# Altium footprint library altiumll.PcbLib: 39 footprints (part 3 of 3)
Each footprint in its own frame and in the unit in brackets; x right, y up, seen from the top. Pads: shape width x height; smd on the part's side, far side on the other; paste and mask are expansions set on the pad; w line width, h text height; cw(c..) or ccw(c..) is an arc to the next point about the centre after c.
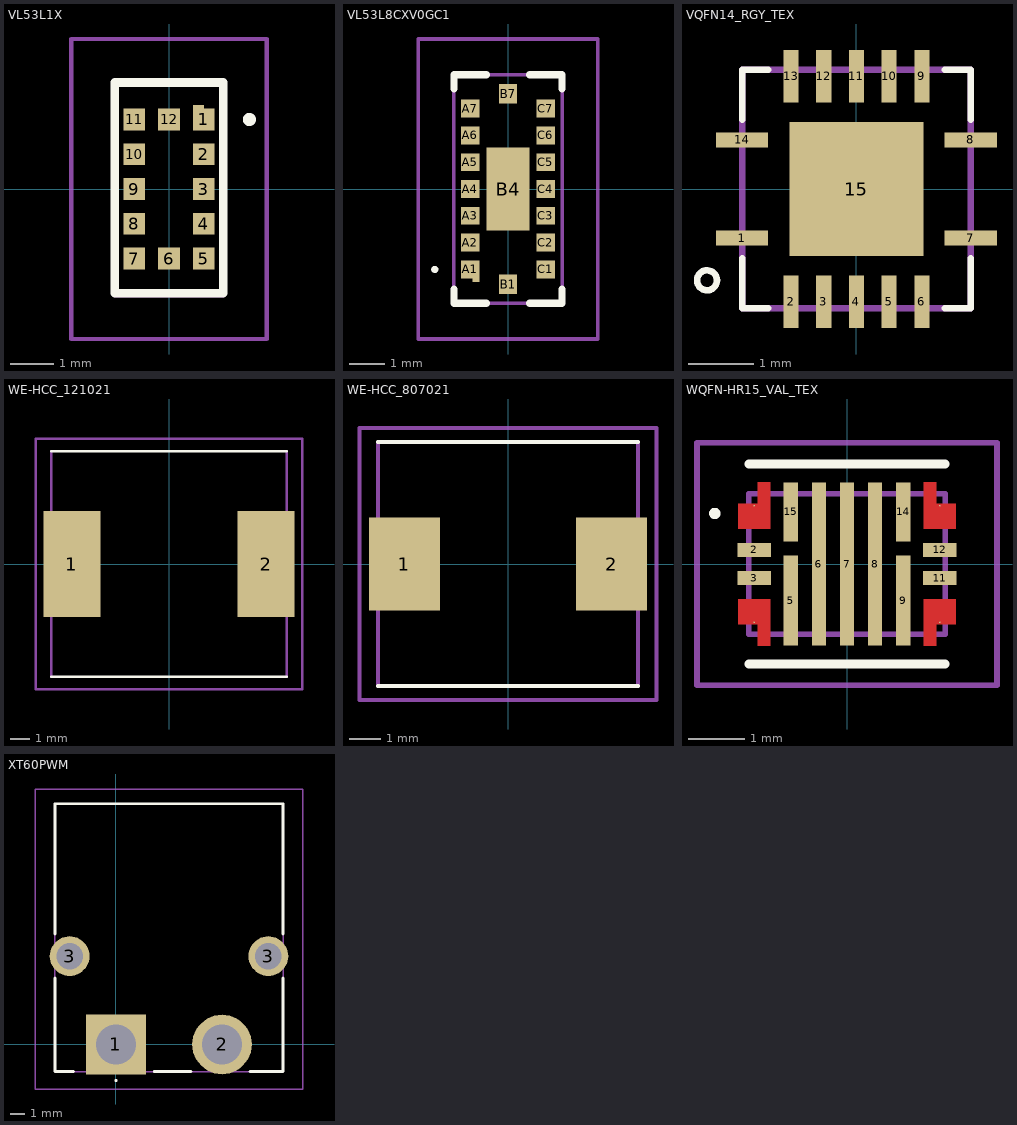
[diagram p2: the footprints below, top view; thin cyan lines are the x and y axes]

## VL53L1X [mm]
pads (13):
  rect 0.25x0.08 smd: 1(0.675,1.89)
  rect 0.5x0.5 smd: 1(0.8,1.6) 2(0.8,0.8) 3(0.8,0) 4(0.8,-0.8) 5(0.8,-1.6) 6(0,-1.6) 7(-0.8,-1.6) 8(-0.8,-0.8) 9(-0.8,0) 10(-0.8,0.8) 11(-0.8,1.6) 12(0,1.6)
Top Overlay:
  lines w0.2: 1.8,1.6 ccw(c1.85,1.6) 1.9,1.6 ; 1.8,1.6 cw(c1.85,1.6) 1.9,1.6 ; 1.8,1.6 ccw(c1.85,1.6) 1.9,1.6 ; -1.25,-2.4 -1.25,2.45 1.25,2.45 1.25,-2.4 -1.25,-2.4
Mechanical 13:
  lines w0.1: -1.25,-2.45 -1.25,2.45 1.25,2.45 1.25,-2.45 -1.25,-2.45
Mechanical 15:
  lines w0.1: -2.25,-3.45 -2.25,3.45 2.25,3.45 2.25,-3.45 -2.25,-3.45
3D body "VL53L1X.stp": height 1.56, standoff 0, extent -1.25,-2.45 1.25,2.45

## VL53L8CXV0GC1 [mm]
pads (18):
  rect 0.515x0.5 smd: A1(-1.058,-2.25) A2(-1.058,-1.5) A3(-1.058,-0.75) A4(-1.058,0) A5(-1.058,0.75) A6(-1.058,1.5) A7(-1.058,2.25) C1(1.058,-2.25) C2(1.058,-1.5) C3(1.058,-0.75) C4(1.058,0) C5(1.058,0.75) C6(1.058,1.5) C7(1.058,2.25)
  rect 0.2x0.1 smd: A1(-0.9,-2.55)
  rect 0.5x0.535 smd: B1(0,-2.668) B7(0,2.668)
  rect 1.2x2.316 smd: B4(0,0)
Top Overlay:
  lines w0.1: -2.1,-2.25 cw(c-2.05,-2.25) -2,-2.25 cw(c-2.05,-2.25) -2.1,-2.25
  lines w0.2: -1.515,-2.8 -1.515,-3.2 -0.6,-3.2 ; -1.515,2.8 -1.515,3.2 -0.6,3.2 ; 0.6,-3.2 1.515,-3.2 1.515,-2.8 ; 0.6,3.2 1.515,3.2 1.515,2.8
Mechanical 13:
  lines w0.1: -1.515,-3.2 -1.515,3.2 1.515,3.2 1.515,-3.2 -1.515,-3.2
Mechanical 15:
  lines w0.1: -2.515,-4.2 -2.515,4.2 2.515,4.2 2.515,-4.2 -2.515,-4.2
3D body "VL53L8CXV0GC_1.stp": height 4.75, standoff 0, extent -2.209,-4.388 1.989,3.809

## VQFN14_RGY_TEX [mm]
pads (15):
  rect 0.8x0.23 smd: 1(-1.75,-0.75) 7(1.75,-0.75) 8(1.75,0.75) 14(-1.75,0.75)
  rect 0.23x0.8 smd: 2(-1,-1.725) 3(-0.5,-1.725) 4(0,-1.725) 5(0.5,-1.725) 6(1,-1.725) 9(1,1.725) 10(0.5,1.725) 11(0,1.725) 12(-0.5,1.725) 13(-1,1.725)
  rect 2.05x2.05 smd: 15(0,0)
Top Overlay:
  circle w0.1: c-2.286,-1.397 r0.153
  lines w0.1: -1.75,-1.061 -1.75,-1.825 -1.35,-1.825 ; -1.75,1.061 -1.75,1.825 -1.35,1.825 ; 1.35,-1.825 1.75,-1.825 1.75,-1.061 ; 1.35,1.825 1.75,1.825 1.75,1.061
Mechanical 13:
  lines w0.1: -1.75,-1.825 -1.75,1.825 1.75,1.825 1.75,-1.825 -1.75,-1.825
3D body "TXS0104ERGYR.stp": height 0.97, standoff 0, extent -1.75,-1.75 1.75,1.75

## WE-HCC_121021 [mm]
pads (2):
  rect 2.9x5.4 smd: 1(-4.95,0) 2(4.95,0)
Top Overlay:
  lines w0.127: -6,-5.75 6,-5.75 ; -6,5.75 6,5.75
Mechanical 13:
  lines w0.127: -6,-5.75 -6,5.75 ; 6,-5.75 6,5.75
Mechanical 15:
  lines w0.127: -6.8,-6.4 -6.8,6.4 6.8,6.4 6.8,-6.4 -6.8,-6.4
3D body "7443320470.stp": height 9.35, standoff -0.15, extent -6.05,-5.7 6.05,5.7

## WE-HCC_807021 [mm]
pads (2):
  rect 2.3x3 smd: 1(-3.35,0) 2(3.35,0)
Top Overlay:
  lines w0.127: -4.2,-3.95 4.2,-3.95 ; -4.2,3.95 4.2,3.95
Mechanical 13:
  lines w0.127: -4.2,-3.95 -4.2,3.95 ; 4.2,-3.95 4.2,3.95
Mechanical 15:
  lines w0.127: -4.8,-4.4 4.8,-4.4 4.8,4.4 -4.8,4.4 -4.8,-4.4
3D body "7443340150.stp": height 7.15, standoff -0.05, extent -4.2,-3.95 4.2,3.95

## WQFN-HR15_VAL_TEX [mm]
pads (15):
  round 0.025 smd: 1(-1.65,1.038) 4(-1.65,-1.038) 10(1.65,-1.038) 13(1.65,1.038)
  rect 0.6x0.25 smd: 2(-1.65,0.251) 3(-1.65,-0.249) 11(1.65,-0.249) 12(1.65,0.251)
  rect 0.25x1.6 smd: 5(-1,-0.649) 9(1,-0.649)
  rect 0.25x2.9 smd: 6(-0.5,0) 7(0,0) 8(0.5,0)
  rect 0.25x1.05 smd: 14(1,0.926) 15(-1,0.926)
Top Layer:
  region: -1.362,-0.625 -1.362,-1.45 -1.587,-1.45 -1.587,-1.075 -1.937,-1.075 -1.937,-0.625
  region: -1.937,0.625 -1.937,1.075 -1.587,1.075 -1.587,1.45 -1.362,1.45 -1.362,0.625
  region: 1.937,-0.625 1.937,-1.075 1.587,-1.075 1.587,-1.45 1.362,-1.45 1.362,-0.625
  region: 1.362,0.625 1.362,1.45 1.587,1.45 1.587,1.075 1.937,1.075 1.937,0.625
Top Overlay:
  lines w0.1: -2.4,0.9 cw(c-2.35,0.9) -2.3,0.9 cw(c-2.35,0.9) -2.4,0.9
  lines w0.152: -1.75,-1.778 1.75,-1.778 ; -1.75,1.778 1.75,1.778
Mechanical 13:
  lines w0.1: -1.75,-1.25 1.75,-1.25 1.75,1.25 -1.75,1.25 -1.75,-1.25
Mechanical 15:
  lines w0.1: -2.667,-2.159 2.667,-2.159 2.667,2.159 -2.667,2.159 -2.667,-2.159
3D body "TPS55285VALR.stp": height 0.9, standoff 0, extent -1.75,-1.25 1.75,1.25

## XT60PWM [mm]
pads (4):
  rect 4.05x4.05 hole 2.7: 1(0,0)
  round 4.05 hole 2.7: 2(7.2,0)
  round 2.7 hole 1.8: 3(-3.15,6) 3(10.35,6)
Top Overlay:
  lines w0.1: 0,-2.5 ccw(c0,-2.45) 0,-2.4 ccw(c0,-2.45) 0,-2.5
  lines w0.2: -4.15,4.5 -4.15,-1.85 -2.9,-1.85 ; -4.15,7.5 -4.15,16.35 11.35,16.35 11.35,7.5 ; 2.6,-1.85 5.1,-1.85 ; 9.1,-1.85 11.35,-1.85 11.35,4.5
Mechanical 13:
  lines w0.1: -4.15,-1.85 11.35,-1.85 11.35,16.35 -4.15,16.35 -4.15,-1.85
Mechanical 15:
  lines w0.1: -5.5,-3.025 12.7,-3.025 12.7,17.35 -5.5,17.35 -5.5,-3.025
3D body "XT60PW-M.stp": height 8.61, standoff -2.84, extent -4.35,-1.82 11.55,16.38